# Altium schematic symbol library test-point.SchLib: 1 symbol
Pins are listed as number, name and electrical type; pins without a type are passive.

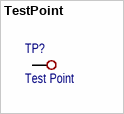
[diagram p0: symbol TestPoint]

## TestPoint
designator TP?, comment Test Point
footprint tp-keystone-5015
pins: 1